# Altium schematic symbol library RC0402FR-0749R9L.SchLib: 1 symbol
Pins are listed as number, name and electrical type; pins without a type are passive.

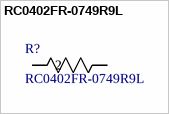
[diagram p0: symbol RC0402FR-0749R9L]

## RC0402FR-0749R9L
designator R?
RES, 49.9, 1%, 0.063 W, 0402; Manufacturer_Name: Yageo; Copyright: Copyright (C) 2025 Ultra Librarian. All rights reserved.; Manufacturer_Part_Number: RC0402FR-0749R9L
footprint RC0402N_YAG
pins: 1, 2